# EAGLE library part CON_JST_PH_6 (library dp_devices.v6)
JST PH series 2.0mm Pitch SMD side entry http://www.jst-mfg.com/product/pdf/eng/ePH.pdf
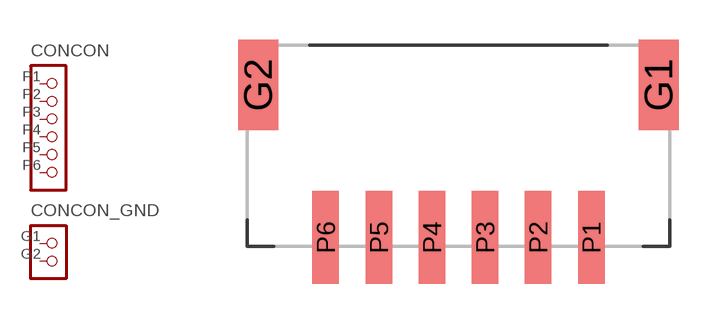
[diagram p174: symbol with the pads of CON_JST_PH_SMD_6; footprint CON_JST_PH_SMD_6]

Designator prefix CON; gates CON=HEADER1X6 CON_GND=HEADER1X2

## CON_JST_PH_6  [CON_JST_PH_SMD_6]
G1  CON_GND:1  pas
G2  CON_GND:2  pas
P1  CON:1
P2  CON:2
P3  CON:3  pas
P4  CON:4  pas
P5  CON:5  pas
P6  CON:6  pas

## Footprint CON_JST_PH_SMD_6 (pad centres in mm)
smd 1.5 x 3.4: G1 7.54,1.5; G2 -7.54,1.5
smd 1 x 3.5: P1 5,-4.25; P2 3,-4.25; P3 1,-4.25; P4 -1,-4.25; P5 -3,-4.25; P6 -5,-4.25